# Altium schematic symbol library 电感.SchLib: 4 symbols
Pins are listed as number, name and electrical type; pins without a type are passive.

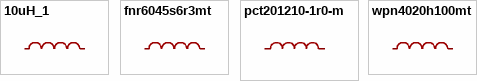
[diagram p0: symbols 10uH_1 to wpn4020h100mt]

## 10uH_1
designator L??  (value not drawn)
Symbol: 10uH_1
footprint BAT-SMD_2P-P2.54_2P-2.54PH-7.0H
pins: 1, 2

## fnr6045s6r3mt
designator L??  (value not drawn)
电感值:6.3uH;精度:±20%;额定电流:3.3A;饱和电流(Isat):4.7A;类型:磁胶屏蔽绕线合金电感;; Manufacturer: cjiang(长江微电); AddInBom: yes; ModelId: a3b1a14981914683918d1fd1319c5d5c; ModelName: IND-SMD_L6.0-W6.0-H2.8; ModelTransform: 236.22,237.007,0,90,0,0,0,0,0; Value: 6.3uH; Tolerance: ±20%; Current Rating: 3.3A; Current - Saturation(Isat): 4.7A; DC Resistance(DCR): 40mΩ; Symbol: FNR6045S6R3MT; LCSC Part Name: 6.3uH ±20% 4.7A; SupplierPart: C168071; ManufacturerPart: FNR6045S6R3MT; Supplier Footprint: SMD,6x6mm; JLCPCB Part Class: Extended Part; Datasheet: https://atta.szlcsc.com/upload/public/pdf/source/20190327/C167925_9EFF0AABC4CA629C2CC95961DBF7D39D.pdf; Supplier: LCSC; ConvertToPcb: yes; FootprintName: IND-SMD_L6.0-W6.0_FNR60XXS; Type: 磁胶屏蔽绕线合金电感
footprint IND-SMD_L6.0-W6.0_FNR60XXS
pins: 1, 2

## pct201210-1r0-m
designator L??  (value not drawn)
小型化一体成型T-CORE，小体积，扁线工艺，感值小; Manufacturer: JIERR(捷而瑞); AddInBom: yes; Value: 1uH; Tolerance: ±20%; Current Rating: 3A; Current - Saturation(Isat): 3.3A; DC Resistance(DCR): 80mΩ; Type: 一体成型电感; Symbol: PCT201210-1R0-M; LCSC Part Name: 1μH ±20% 3.3A; SupplierPart: C54557069; ManufacturerPart: PCT201210-1R0-M; Supplier Footprint: 0805; JLCPCB Part Class: Extended Part; Datasheet: https://item.szlcsc.com/datasheet/PCT201210-1R0-M/57921657.html; Supplier: LCSC; ConvertToPcb: yes; FootprintName: IND-SMD_L2.0-W1.2_PCT201210
footprint IND-SMD_L2.0-W1.2_PCT201210
pins: 1, 2

## wpn4020h100mt
designator L??  (value not drawn)
电感值:10uH;精度:±20%;额定电流:2A;饱和电流(Isat):3.5A;类型:-;; Manufacturer: Sunlord(顺络); AddInBom: yes; ModelId: 45bc3737ecfd4f3bb122605ee525b018; ModelName: IND-SMD_L4.0-W4.0-H1.9; ModelTransform: 157.48,157.484,0,0,0,0,0,0,0; Value: 10uH; Tolerance: ±20%; Current Rating: 2A; Current - Saturation(Isat): 3.5A; DC Resistance(DCR): 216mΩ; Symbol: WPN4020H100MT; LCSC Part Name: 10uH ±20% 3.5A; SupplierPart: C98364; ManufacturerPart: WPN4020H100MT; Supplier Footprint: SMD,4x4mm; JLCPCB Part Class: Extended Part; Datasheet: https://item.szlcsc.com/datasheet/WPN4020H100MT/99573.html; Supplier: LCSC; ConvertToPcb: yes; FootprintName: IND-SMD_L4.0-W4.0; Type: -; Ratings: -
footprint IND-SMD_L4.0-W4.0
pins: 1, 2